# Altium footprint library Thunderscope_Rev5.3.PcbLib: 68 footprints (part 3 of 5)
Each footprint in its own frame and in the unit in brackets; x right, y up, seen from the top. Pads: shape width x height; smd on the part's side, far side on the other; paste and mask are expansions set on the pad; w line width, h text height; cw(c..) or ccw(c..) is an arc to the next point about the centre after c.
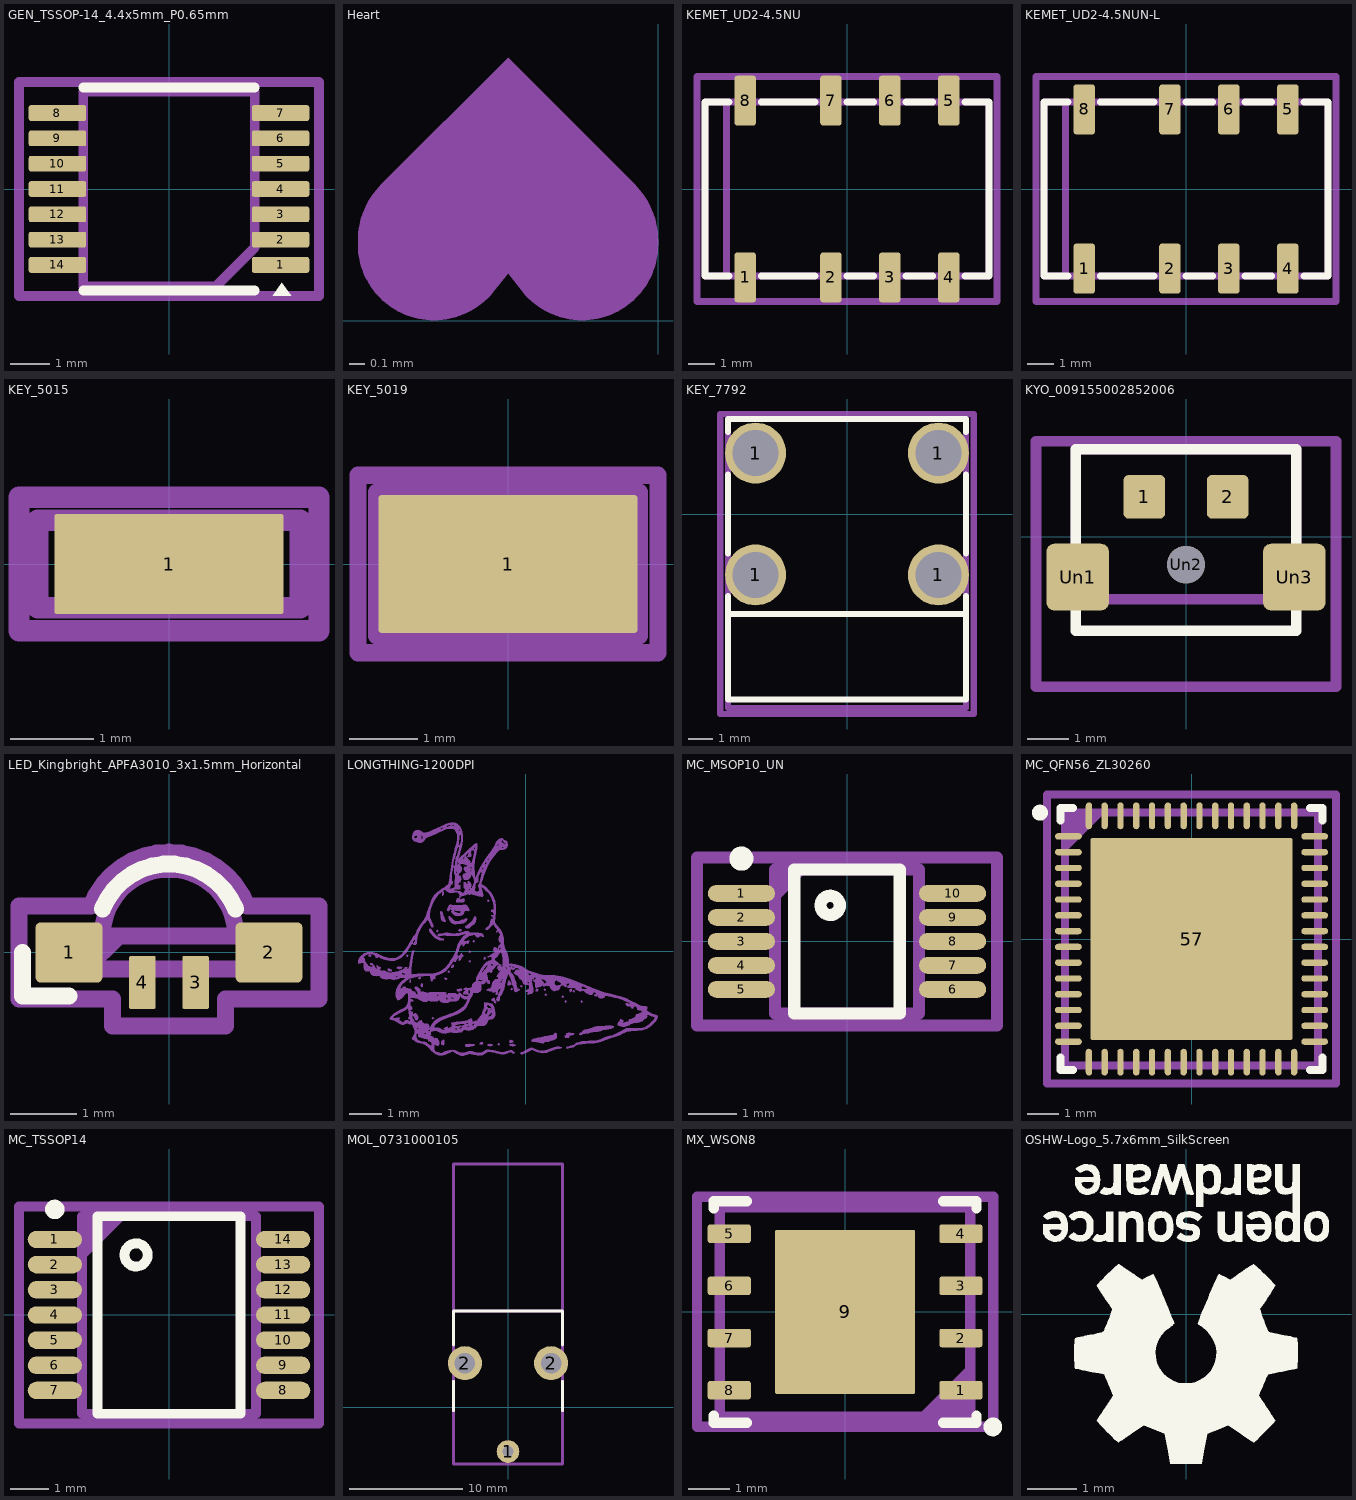
[diagram p2: the footprints below, top view; thin cyan lines are the x and y axes]

## GEN_TSSOP-14_4.4x5mm_P0.65mm [mm]
pads (14):
  rrect25% 1.475x0.4 smd mask+0: 1(2.863,-1.95) 2(2.863,-1.3) 3(2.863,-0.65) 4(2.863,0) 5(2.863,0.65) 6(2.863,1.3) 7(2.863,1.95) 8(-2.863,1.95) 9(-2.863,1.3) 10(-2.863,0.65) 11(-2.863,0) 12(-2.863,-0.65) 13(-2.863,-1.3) 14(-2.863,-1.95)
Top Overlay:
  region: 2.66,-2.74 3.14,-2.74 2.9,-2.41
  lines w0.254: -2.2,-2.61 0,-2.61 2.2,-2.61 ; -2.2,2.61 0,2.61 2.2,2.61
Mechanical 4:
  lines w0.254: -3.85,-2.75 -3.85,2.75 3.85,2.75 3.85,-2.75 -3.85,-2.75
Mechanical 7:
  lines w0.254: -2.2,-2.5 -2.2,2.5 2.2,2.5 2.2,-1.5 1.2,-2.5 -2.2,-2.5
  text "'.Designator'" at 0.285,-0.445 h1
3D body "TSSOP-14_4.4x5mm_P0.65mm (1).step": height 1, standoff 0, extent -3.2,-2.5 3.2,2.5

## Heart [mm]
Top Solder:
  region: -1.757,0.865 -1.774,0.847 -1.791,0.828 -1.806,0.808 -1.82,0.788 -1.833,0.767 -1.845,0.745 -1.857,0.723 -1.867,0.701 -1.875,0.678 -1.883,0.654 -1.89,0.631 -1.895,0.606 -1.899,0.582 -1.903,0.557 -1.904,0.533 -1.905,0.507 -1.905,0.485 -1.904,0.46 -1.903,0.435 -1.899,0.411 -1.895,0.388 -1.89,0.364 -1.883,0.341 -1.876,0.319 -1.867,0.297 -1.857,0.276 -1.847,0.255 -1.835,0.235 -1.823,0.215 -1.809,0.196 -1.795,0.178 -1.78,0.16 -1.764,0.144 -1.747,0.128 -1.729,0.113 -1.711,0.098 -1.692,0.085 -1.673,0.072 -1.652,0.061 -1.632,0.05 -1.61,0.04 -1.588,0.032 -1.566,0.024 -1.543,0.018 -1.52,0.012 -1.496,0.008 -1.472,0.005 -1.447,0.003 -1.423,0.002 -1.395,0.003 -1.368,0.005 -1.341,0.009 -1.315,0.015 -1.289,0.021 -1.263,0.029 -1.238,0.039 -1.214,0.05 -1.19,0.062 -1.167,0.076 -1.144,0.091 -1.123,0.107 -1.102,0.124 -1.082,0.143 -1.063,0.163 -1.046,0.183 -0.953,0.3 -0.859,0.183 -0.842,0.163 -0.823,0.143 -0.803,0.124 -0.782,0.107 -0.761,0.091 -0.738,0.076 -0.715,0.062 -0.691,0.05 -0.667,0.039 -0.642,0.029 -0.616,0.021 -0.59,0.015 -0.564,0.009 -0.537,0.005 -0.51,0.003 -0.482,0.002 -0.458,0.003 -0.433,0.005 -0.409,0.008 -0.385,0.012 -0.362,0.018 -0.339,0.024 -0.317,0.032 -0.295,0.04 -0.273,0.05 -0.253,0.061 -0.232,0.072 -0.213,0.085 -0.194,0.098 -0.176,0.113 -0.158,0.128 -0.141,0.144 -0.125,0.16 -0.11,0.178 -0.096,0.196 -0.082,0.215 -0.07,0.235 -0.058,0.255 -0.048,0.276 -0.038,0.297 -0.029,0.319 -0.022,0.341 -0.015,0.364 -0.01,0.388 -0.006,0.411 -0.002,0.435 -0.001,0.46 0,0.485 0,0.507 -0.001,0.533 -0.002,0.557 -0.006,0.582 -0.01,0.606 -0.015,0.631 -0.022,0.654 -0.03,0.678 -0.038,0.701 -0.048,0.723 -0.06,0.745 -0.072,0.767 -0.085,0.788 -0.099,0.808 -0.114,0.828 -0.131,0.847 -0.148,0.865 -0.953,1.669

## KEMET_UD2-4.5NU [mm]
pads (8):
  rrect25% 0.8x1.86 smd mask+0: 1(-3.8,-3.3) 2(-0.6,-3.3) 3(1.6,-3.3) 4(3.8,-3.3) 5(3.8,3.3) 6(1.6,3.3) 7(-0.6,3.3) 8(-3.8,3.3)
Top Overlay:
  lines w0.254: -4.4,-3.25 -5.3,-3.25 -5.3,3.25 -4.4,3.25 ; -3.2,-3.25 -1.2,-3.25 ; -3.2,3.25 -1.2,3.25 ; 0,-3.25 1,-3.25 ; 0,3.25 1,3.25 ; 2.2,-3.25 3.2,-3.25 ; 2.2,3.25 3.2,3.25 ; 4.4,-3.25 5.3,-3.25 5.3,3.25 4.4,3.25
Mechanical 5:
  lines w0.254: -5.6,-4.2 5.6,-4.2 5.6,4.2 -5.6,4.2 -5.6,-4.2
Mechanical 6:
  lines w0.254: -4.5,-3.25 -4.5,3.25 ; -5.3,-3.25 -5.3,3.25 -4.4,3.25 -1.2,3.25 1,3.25 3.2,3.25 5.3,3.25 5.3,-3.25 4.4,-3.25 2.2,-3.25 0,-3.25 -3.2,-3.25 -5.3,-3.25
  text "'.Designator'" at 1.069,0.332 h1
3D body "UD2-4.5NUN-L.step": height 5.92, standoff 0.01, extent -5.6,-3.4 5.3,3.4

## KEMET_UD2-4.5NUN-L [mm]
pads (8):
  rrect25% 0.8x1.86 smd mask+0: 1(-3.8,-2.97) 2(-0.6,-2.97) 3(1.6,-2.97) 4(3.8,-2.97) 5(3.8,2.97) 6(1.6,2.97) 7(-0.6,2.97) 8(-3.8,2.97)
Top Overlay:
  lines w0.254: -4.4,-3.25 -5.3,-3.25 -5.3,3.25 -4.4,3.25 ; -3.2,-3.25 -1.2,-3.25 ; -3.2,3.25 -1.2,3.25 ; 0,-3.25 1,-3.25 ; 0,3.25 1,3.25 ; 2.2,-3.25 3.2,-3.25 ; 2.2,3.25 3.2,3.25 ; 4.4,-3.25 5.3,-3.25 5.3,3.25 4.4,3.25
Mechanical 5:
  lines w0.254: -5.6,-4.2 -5.6,4.2 5.6,4.2 5.6,-4.2 -5.6,-4.2
Mechanical 6:
  lines w0.254: -4.5,-3.25 -4.5,3.25 ; -5.3,-3.25 -3.2,-3.25 0,-3.25 2.2,-3.25 4.4,-3.25 5.3,-3.25 5.3,3.25 3.2,3.25 1,3.25 -1.2,3.25 -4.4,3.25 -5.3,3.25 -5.3,-3.25
  text "'.Designator'" at 1.069,0.332 h1
3D body "UD2-4.5NUN-L.step": height 5.92, standoff 0.01, extent -5.6,-3.4 5.3,3.4

## KEY_5015 [mm]
pads (1):
  rrect5% 2.75x1.2 smd mask+0: 1(0,0)
Mechanical 4:
  lines w0.254: -1.8,-0.8 1.8,-0.8 1.8,0.8 -1.8,0.8 -1.8,-0.8
Mechanical 7:
  lines w0.254: -1.575,-0.525 1.575,-0.525 1.575,0.525 -1.575,0.525 -1.575,-0.525
  text "'.Designator'" at -0.284,-0.14 h0.5

## KEY_5019 [mm]
pads (1):
  rrect5% 3.8x2.03 smd mask+0: 1(0,0)
Mechanical 4:
  lines w0.254: -2.2,-1.3 2.2,-1.3 2.2,1.3 -2.2,1.3 -2.2,-1.3
Mechanical 7:
  lines w0.254: -1.925,-1.05 1.925,-1.05 1.925,1.05 -1.925,1.05 -1.925,-1.05
  text "'.Designator'" at -0.205,-0.14 h0.5

## KEY_7792 [mm]
pads (4):
  round 2.5 hole 1.9 mask+0: 1(-3.75,-2.5) 1(-3.75,2.5) 1(3.75,-2.5) 1(3.75,2.5)
Top Overlay:
  lines w0.254: -4.875,-3.375 -4.875,-4.1 ; -4.875,-1.625 -4.875,1.625 ; -4.875,3.375 -4.875,3.9 4.875,3.9 4.875,3.375 ; 4.875,-3.375 4.875,-4.1 ; 4.875,-1.625 4.875,1.625 ; -4.875,-4.1 4.875,-4.1 ; -4.875,-4.1 -4.875,-7.6 4.875,-7.6 4.875,-4.1
Mechanical 5:
  lines w0.254: -5.2,-8.2 -5.2,4.1 5.2,4.1 5.2,-8.2 -5.2,-8.2
Mechanical 6:
  lines w0.254: -4.875,-7.96 -4.875,3.9 4.875,3.9 4.875,-7.96 -4.875,-7.96
  text "'.Designator'" at -0.638,-0.276 h1

## KYO_009155002852006 [mm]
pads (5):
  rrect25% 1x1.05 smd mask+0: 1(-1,0.962) 2(1,0.962)
  rrect25% 1.5x1.6 smd mask+0: Un1(-2.6,-0.962) Un3(2.6,-0.962)
  round 0.9 hole 0.9 mask+0: Un2(0,-0.663)
Top Overlay:
  lines w0.254: -2.65,-2.25 2.65,-2.25 2.65,2.1 -2.65,2.1 -2.65,-2.25
Mechanical 5:
  lines w0.254: -3.6,-3.6 3.6,-3.6 3.6,2.3 -3.6,2.3 -3.6,-3.6
Mechanical 6:
  lines w0.254: -2.65,-1.5 2.65,-1.5 2.65,2.1 -2.65,2.1 -2.65,-1.5
  text "'.Designator'" at -0.194,-0.182 h0.5
3D body "009155002852006 (1).step": height 5, standoff -1.2, extent -3.191,-3.41 3.154,1.291

## LED_Kingbright_APFA3010_3x1.5mm_Horizontal [mm]
pads (4):
  rrect15% 1x0.9 smd mask+0: 1(-1.5,0) 2(1.5,0)
  rrect15% 0.4x0.8 smd mask+0: 3(0.4,-0.45) 4(-0.4,-0.45)
Top Overlay:
  lines w0.254: -2.2,0 -2.2,-0.65 -1.5,-0.65 ; -1,0.65 cw(c0,0.25) 1,0.65
Mechanical 5:
  lines w0.254: -2.25,-0.7 -0.85,-0.7 -0.85,-1.1 0.85,-1.1 0.85,-0.7 2.25,-0.7 2.25,0.7 1.17,0.7 ccw(c0,0.25) -1.17,0.7 -2.25,0.7 -2.25,-0.7
Mechanical 6:
  lines w0.254: -1.25,-0.25 -0.75,0.25 ; -1,0.25 cw(c0,0.25) 1,0.25 ; -1.5,-0.25 -1.5,0.25 1.5,0.25 1.5,-0.25 -1.5,-0.25
  text "'.Designator'" at -0.073,-0.083 h0.3
3D body "APFA3010LSEEZGKQBKC--3DModel-STEP-56544.step": height 1, standoff 0, extent -1.5,-0.381 1.5,1.112

## LONGTHING-1200DPI [mm]
Top Solder:
  drawing of 46 lines, arcs and shapes, not listed

## MC_MSOP10_UN [mm]
pads (10):
  rrect100% 1.4x0.35 smd mask+0: 1(-2.2,1) 2(-2.2,0.5) 3(-2.2,0) 4(-2.2,-0.5) 5(-2.2,-1) 6(2.2,-1) 7(2.2,-0.5) 8(2.2,0) 9(2.2,0.5) 10(2.2,1)
Top Overlay:
  circle w0.254: c-2.2,1.725 r0.125
  circle w0.254: c-0.35,0.75 r0.2
  lines w0.254: -1.1,-1.5 -1.1,1.5 1.1,1.5 1.1,-1.5 -1.1,-1.5
Mechanical 5:
  lines w0.254: -3.125,-1.75 -3.125,1.75 3.125,1.75 3.125,-1.75 -3.125,-1.75
Mechanical 6:
  region: -1.5,0.8 -1.5,1.5 -0.8,1.5
  lines w0.254: -1.5,-1.5 -1.5,1.5 1.5,1.5 1.5,-1.5 -1.5,-1.5
  text "'.Designator'" at -0.114,0.108 h0.4
3D body "MC_MSOP10_UN.step": height 1.1, standoff 0, extent -2.45,-1.5 2.45,1.5

## MC_QFN56_ZL30260 [mm]
pads (57):
  rrect100% 0.85x0.2 smd mask+0: 1(-3.9,3.25) 2(-3.9,2.75) 3(-3.9,2.25) 4(-3.9,1.75) 5(-3.9,1.25) 6(-3.9,0.75) 7(-3.9,0.25) 8(-3.9,-0.25) 9(-3.9,-0.75) 10(-3.9,-1.25) 11(-3.9,-1.75) 12(-3.9,-2.25) 13(-3.9,-2.75) 14(-3.9,-3.25) 29(3.9,-3.25) 30(3.9,-2.75) 31(3.9,-2.25) 32(3.9,-1.75) 33(3.9,-1.25) 34(3.9,-0.75) 35(3.9,-0.25) 36(3.9,0.25) 37(3.9,0.75) 38(3.9,1.25) 39(3.9,1.75) 40(3.9,2.25) 41(3.9,2.75) 42(3.9,3.25)
  rrect100% 0.2x0.85 smd mask+0: 15(-3.25,-3.9) 16(-2.75,-3.9) 17(-2.25,-3.9) 18(-1.75,-3.9) 19(-1.25,-3.9) 20(-0.75,-3.9) 21(-0.25,-3.9) 22(0.25,-3.9) 23(0.75,-3.9) 24(1.25,-3.9) 25(1.75,-3.9) 26(2.25,-3.9) 27(2.75,-3.9) 28(3.25,-3.9) 43(3.25,3.9) 44(2.75,3.9) 45(2.25,3.9) 46(1.75,3.9) 47(1.25,3.9) 48(0.75,3.9) 49(0.25,3.9) 50(-0.25,3.9) 51(-0.75,3.9) 52(-1.25,3.9) 53(-1.75,3.9) 54(-2.25,3.9) 55(-2.75,3.9) 56(-3.25,3.9)
  rrect2% 6.4x6.4 smd paste-6.4 mask+0: 57(0,0)
Top Overlay:
  circle w0.254: c-4.8,4 r0.125
  lines w0.254: -4.15,-3.75 -4.15,-4.15 -3.75,-4.15 ; -4.15,3.75 -4.15,4.15 -3.75,4.15 ; 3.75,-4.15 4.15,-4.15 4.15,-3.75 ; 3.75,4.15 4.15,4.15 4.15,3.75
Top Paste:
  region: 3.1,1.2 1.2,1.2 1.2,3.1 3.1,3.1
  region: -1.2,1.2 -3.1,1.2 -3.1,3.1 -1.2,3.1
  region: 0.95,1.2 -0.95,1.2 -0.95,3.1 0.95,3.1
  region: 3.1,-0.95 1.2,-0.95 1.2,0.95 3.1,0.95
  region: 0.95,-0.95 -0.95,-0.95 -0.95,0.95 0.95,0.95
  region: -1.2,-0.95 -3.1,-0.95 -3.1,0.95 -1.2,0.95
  region: 0.95,-3.1 -0.95,-3.1 -0.95,-1.2 0.95,-1.2
  region: 3.1,-3.1 1.2,-3.1 1.2,-1.2 3.1,-1.2
  region: -1.2,-3.1 -3.1,-3.1 -3.1,-1.2 -1.2,-1.2
Mechanical 5:
  lines w0.254: -4.575,-4.575 -4.575,4.575 4.575,4.575 4.575,-4.575 -4.575,-4.575
Mechanical 6:
  region: -4,2.75 -4,4 -2.75,4
  lines w0.254: -4,-4 -4,4 4,4 4,-4 -4,-4
  text "'.Designator'" at -0.282,0.278 h1
3D body "MC_QFN56_ZL30260.step": height 1, standoff 0, extent -4.001,-4.001 4.001,4.001

## MC_TSSOP14 [mm]
pads (14):
  rrect100% 1.4x0.45 smd mask+0: 1(-2.95,1.95) 2(-2.95,1.3) 3(-2.95,0.65) 4(-2.95,0) 5(-2.95,-0.65) 6(-2.95,-1.3) 7(-2.95,-1.95) 8(2.95,-1.95) 9(2.95,-1.3) 10(2.95,-0.65) 11(2.95,0) 12(2.95,0.65) 13(2.95,1.3) 14(2.95,1.95)
Top Overlay:
  circle w0.254: c-0.85,1.55 r0.3
  circle w0.254: c-2.95,2.725 r0.125
  lines w0.254: -1.85,-2.55 1.85,-2.55 1.85,2.55 -1.85,2.55 -1.85,-2.55
Mechanical 5:
  lines w0.254: -3.875,-2.8 3.875,-2.8 3.875,2.8 -3.875,2.8 -3.875,-2.8
Mechanical 6:
  region: -2.25,1.375 -2.25,2.55 -1.075,2.55
  lines w0.254: -2.25,-2.55 -2.25,2.55 2.25,2.55 2.25,-2.55 -2.25,-2.55
  text "'.Designator'" at 0.142,-0.138 h0.5
3D body "MC_TSSOP14.step": height 1.2, standoff 0, extent -3.2,-2.55 3.2,2.55

## MOL_0731000105 [mm]
pads (3):
  round 2 hole 1 mask+0: 1(0,-3.9)
  round 3 hole 1.8 mask+0: 2(-3.8,3.9) 2(3.8,3.9)
Top Overlay:
  lines w0.254: -4.8,-0.3 -4.8,2.3 ; -4.8,5.5 -4.8,8.5 4.8,8.5 4.8,5.5 ; 4.8,-0.3 4.8,2.3
Mechanical 5:
  lines w0.254: -4.8,-5 -4.8,8.5 4.8,8.5 4.8,-5 -4.8,-5
Mechanical 6:
  lines w0.254: -4.8,-5 4.8,-5 4.8,21.475 -4.8,21.475 -4.8,-5
  text "'.Designator'" at 0.361,2.807 h1

## MX_WSON8 [mm]
pads (9):
  rrect25% 1.05x0.45 smd mask+0: 1(2.82,-1.905) 2(2.82,-0.635) 3(2.82,0.635) 4(2.82,1.905) 5(-2.82,1.905) 6(-2.82,0.635) 7(-2.82,-0.635) 8(-2.82,-1.905)
  rrect2% 3.4x4 smd paste-1.7 mask+0: 9(0,0)
Top Overlay:
  circle w0.254: c3.6,-2.8 r0.1
  lines w0.254: -3.2,-2.53 -3.2,-2.7 -2.395,-2.7 ; -3.2,2.53 -3.2,2.7 -2.395,2.7 ; 2.395,-2.7 3.2,-2.7 3.2,-2.53 ; 2.395,2.7 3.2,2.7 3.2,2.53
Top Paste:
  lines w0.254: -1.6,-1.9 -1.6,-0.1 -0.1,-0.1 -0.1,-1.9 -1.6,-1.9 ; -1.6,0.1 -1.6,1.9 -0.1,1.9 -0.1,0.1 -1.6,0.1 ; 0.1,-1.9 0.1,-0.1 1.6,-0.1 1.6,-1.9 0.1,-1.9 ; 0.1,0.1 0.1,1.9 1.6,1.9 1.6,0.1 0.1,0.1
Mechanical 4:
  lines w0.254: -3.605,-2.8 3.605,-2.8 3.605,2.8 -3.605,2.8 -3.605,-2.8
Mechanical 7:
  region: 1.75,-2.55 3.05,-2.55 3.05,-1.25
  lines w0.254: -3.05,-2.55 -3.05,2.55 3.05,2.55 3.05,-2.55 -3.05,-2.55
  text "'.Designator'" at 0.53,0.184 h1
3D body "MX_WSON8.step": height 0.8, standoff 0, extent -3.051,-2.55 3.051,2.55

## OSHW-Logo_5.7x6mm_SilkScreen [mm]
Top Overlay:
  drawing of 18 lines, arcs and shapes, not listed